# Altium footprint library Connectors.PcbLib: 320 footprints (part 2 of 20)
Each footprint in its own frame and in the unit in brackets; x right, y up, seen from the top. Pads: shape width x height; smd on the part's side, far side on the other; paste and mask are expansions set on the pad; w line width, h text height; cw(c..) or ccw(c..) is an arc to the next point about the centre after c.
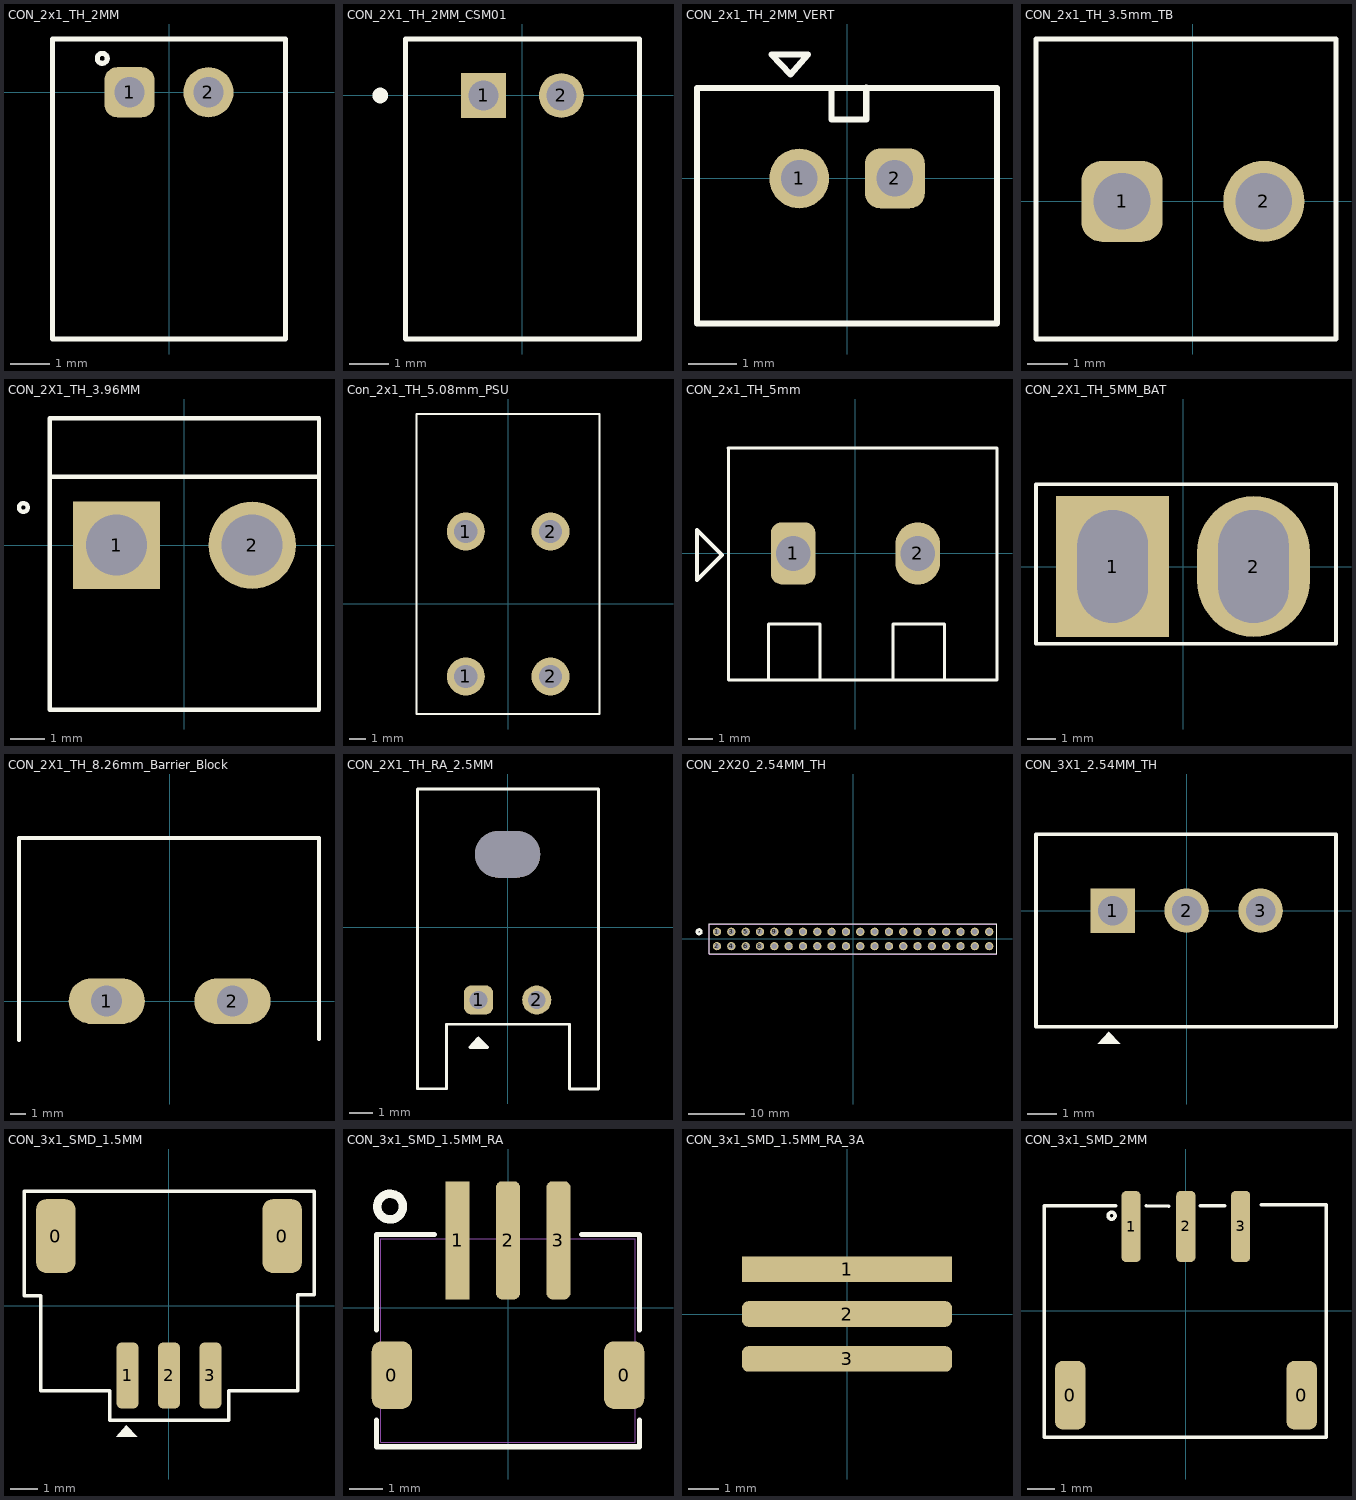
[diagram p1: the footprints below, top view; thin cyan lines are the x and y axes]

## CON_2x1_TH_2MM [mm] "/20190307/N-A.Potosi"
pads (2):
  rrect50% 1.27x1.27 hole 0.762: 1(-1,0)
  round 1.27 hole 0.762: 2(1,0)
Top Overlay:
  circle w0.127: c-1.69,0.86 r0.127
  lines w0.127: -2.95,-6.25 -2.95,1.35 2.95,1.35 2.95,-6.25 -2.95,-6.25
3D body "S2B-PH-K-S(LF)(SN)--3DModel-STEP-56544.STEP": height 4.8, standoff -3.38, extent -2.96,-6.27 2.94,1.33

## CON_2X1_TH_2MM_CSM01 [mm] "/20200121/V-A.Patino"
pads (2):
  rect 1.15x1.15 hole 0.762: 1(-1,0)
  round 1.15 hole 0.762: 2(1,0)
Top Overlay:
  circle w0.2: c-3.65,0 r0.1
  lines w0.127: -3,-6.25 -3,1.45 3.007,1.45 3.007,-6.25 -3,-6.25
3D body "c-440055-2-b3-3d.stp": height 4.96, standoff -3.39, extent -3,-6.25 3,1.45

## CON_2x1_TH_2MM_VERT [mm] "/20210803/J-E.Pachon"
pads (2):
  round 1.25 hole 0.762: 1(-1,0)
  rrect50% 1.25x1.25 hole 0.762: 2(1,0)
Top Overlay:
  lines w0.127: -0.33,1.89 -0.33,1.23 0.4,1.23 0.4,1.9 ; -3.136,-3.03 -3.136,1.89 3.132,1.89 3.132,-3.03 -3.136,-3.03 ; -1.58,2.589 -0.818,2.589 -1.184,2.175 -1.58,2.589
3D body "B2B-PH-K-S.step": height 6, standoff -3.4, extent -2.94,-2.77 2.96,1.93

## CON_2x1_TH_3.5mm_TB [mm] "/ 20190222 / C-A.Serna.A"
height 0.31
pads (2):
  rrect50% 2x2 hole 1.397: 1(-1.75,0)
  round 2 hole 1.397: 2(1.75,0)
Top Overlay:
  lines w0.127: -3.872,-3.395 -3.872,4.005 3.528,4.005 3.528,-3.395 -3.872,-3.395
3D body "691214110002 (rev1).stp": height 8.6, standoff -3.6, extent -3.872,-3.395 3.528,4.005

## CON_2X1_TH_3.96MM [mm] "/20220519/F-A.Ospina"
pads (2):
  rect 2.55x2.55 hole 1.778: 1(-1.98,0)
  round 2.55 hole 1.778: 2(1.98,0)
Top Overlay:
  circle w0.127: c-4.7,1.1 r0.127
  lines w0.127: -3.93,2 -3.93,3.7 3.93,3.7 3.93,2 ; -3.93,2 3.93,2 ; -3.93,2 -3.93,-4.8 3.93,-4.8 3.93,2
3D body "B2P-VH(LF)(SN)--3DModel-STEP-56544.STEP": height 10.91, standoff -3.69, extent -3.93,-4.6 3.93,3.9

## Con_2x1_TH_5.08mm_PSU [mil] "20190515 / V-A.Patino"
pads (4):
  round 90 hole 55: 1(-100,-171.26) 1(-100,171.26) 2(100,-171.26) 2(100,171.26)
Top Overlay:
  lines w5: -216.14,-259.84 -216.14,448.82 215.35,448.82 215.35,-259.84 -216.14,-259.84
3D body "1017503.stp": height 748.03, standoff -137.8, extent -216.14,-259.84 215.35,448.82

## CON_2x1_TH_5mm [mm] "/ 20201015 / C-A.Serna.A"
height 12.5
pads (2):
  rrect50% 1.8x2.5 hole 1.397: 1(-2.5,0)
  oval 1.8x2.5 hole 1.397: 2(2.5,0)
Top Overlay:
  lines w0.127: -5.103,4.229 5.68,4.229 5.68,-5.08 -5.101,-5.08 -5.101,4.229 ; -3.49,-5.08 -3.49,-2.83 -1.43,-2.83 -1.43,-5.08 ; 1.51,-5.08 1.51,-2.83 3.57,-2.83 3.57,-5.077
  lines w0.152: -6.36,-1.07 -6.36,0.94 -5.355,-0.065 -6.36,-1.07
3D body "1935161--3DModel-STEP-56544.STEP": height 11.41, standoff -3.49, extent -5,-5.1 5.4,3.9

## CON_2X1_TH_5MM_BAT [mm] "/20220107/J-E.Pachon"
pads (2):
  rect 4x5 hole 4 slot 2.5 at 0 deg: 1(-2.5,0)
  oval 4x5 hole 4 slot 2.5 at 0 deg: 2(2.5,0)
Top Overlay:
  lines w0.127: -5.218,-2.743 5.425,-2.743 5.425,2.921 -5.218,2.921 -5.218,-2.743
3D body "User Library-XT30.step": height 12.6, standoff -2.9, extent -5.109,-2.548 5.291,2.752

## CON_2X1_TH_8.26mm_Barrier_Block [mm] "/20200618 / C.E-Rincon"
pads (2):
  oval 5x3 hole 2.032: 1(-4.125,0) 2(4.125,0)
Top Overlay:
  lines w0.254: -9.875,-2.55 -9.875,10.7 9.8,10.7 9.8,-2.475
3D body "387007502.stp": height 12.71, standoff -3.54, extent -9.321,-2.55 9.221,10.15

## CON_2X1_TH_RA_2.5MM [mm] "/ 20200528 / J-P.Vargas.A"
pads (3):
  rrect50% 1.25x1.25 hole 0.762: 1(-1.25,-3.125)
  round 1.25 hole 0.762: 2(1.25,-3.125)
  oval 2.8x2 hole 2.794 slot 2 at 90 deg: ""(0,3.125)
Top Overlay:
  region: -1.621,-5.17 -0.859,-5.17 -1.254,-4.756
  lines w0.127: -3.879,-6.94 -3.879,5.93 3.91,5.93 3.91,-6.95 2.65,-6.95 2.65,-4.17 -2.63,-4.17 -2.63,-6.94 -3.879,-6.94 ; -1.621,-5.17 -0.859,-5.17 -1.254,-4.756 -1.621,-5.17
3D body "c-1744426-2-d-3d.stp": height 7.61, standoff -3.31, extent -3.73,-6.821 3.77,5.779

## CON_2X20_2.54MM_TH [mil] "/20220114/J-E.Pachon"
pads (40):
  round 58 hole 38 mask+0: 1(-950,50) 2(-950,-50) 3(-850,50) 4(-850,-50) 5(-750,50) 6(-750,-50) 7(-650,50) 8(-650,-50) 9(-550,50) 10(-550,-50) 11(-450,50) 12(-450,-50) 13(-350,50) 14(-350,-50) 15(-250,50) 16(-250,-50) 17(-150,50) 18(-150,-50) 19(-50,50) 20(-50,-50) 21(50,50) 22(50,-50) 23(150,50) 24(150,-50) 25(250,50) 26(250,-50) 27(350,50) 28(350,-50) 29(450,50) 30(450,-50) 31(550,50) 32(550,-50) 33(650,50) 34(650,-50) 35(750,50) 36(750,-50) 37(850,50) 38(850,-50) 39(950,50) 40(950,-50)
Top Overlay:
  circle w20: c-1074.5,50 r15
  lines w5: -1004.5,-104.5 -1004.5,104.5 1004.5,104.5 1004.5,-104.5 -1004.5,-104.5
Bottom Overlay:
  circle w20: c-1074.5,50 r15
Mechanical 1:
  lines w5: -1005,-105 -1005,104 1004,104 1004,-105 -1005,-105
3D body "015445840.stp": height 340, standoff -120, extent -1005,-100 994,99

## CON_3X1_2.54MM_TH [mil] "/20230123/J-E.Pachon"
pads (3):
  rect 60x60 hole 40: 1(-100,0)
  round 60 hole 40: 2(0,0) 3(100,0)
Top Overlay:
  region: -119.9,-179.8 -89.9,-179.8 -105.46,-163.48
  lines w5: -203.54,-157 -203.54,103 201.97,103 201.97,-157 -203.54,-157
3D body "705430037.stp": height 464.96, standoff -130.04, extent -200,-160 200,100

## CON_3x1_SMD_1.5MM [mm] "/202010001/J-E.Pachon"
pads (5):
  rrect50% 1.419x2.667 smd: 0(-4.1,2.525) 0(4.1,2.525)
  rrect50% 0.8x2.4 smd: 1(-1.5,-2.525) 2(0,-2.525) 3(1.5,-2.525)
Top Overlay:
  region: -1.91,-4.742 -1.148,-4.742 -1.543,-4.327
  lines w0.127: -5.243,0.355 -5.243,4.145 5.257,4.145 5.257,0.405 4.657,0.405 4.657,-3.075 2.157,-3.075 2.157,-4.152 -2.143,-4.152 -2.143,-3.075 -4.643,-3.075 -4.643,0.355 -5.243,0.355
3D body "5025840370.stp": height 6.81, standoff -0.49, extent -4.423,-3.212 4.377,4.188

## CON_3x1_SMD_1.5MM_RA [mil] "20221111 /V-A.Patino"
pads (5):
  rrect50% 47x79 smd: 0(-135.83,-78.74) 0(135.83,-78.74)
  rect 28x138 smd: 1(-59,78.74)
  rrect50% 28x138 smd: 2(0,78.74) 3(59,78.74)
Top Overlay:
  circle w10: c-137.8,118.11 r15
  lines w6: -153.5,-131.34 -153.5,-162.48 153.5,-162.48 153.5,-131.34 ; -153.5,-26.14 -153.5,85.52 -86.1,85.52 ; 86.1,85.52 153.5,85.52 153.5,-26.14
Mechanical 1:
  lines w1: -148.5,-157.48 148.5,-157.48 148.5,80.52 -148.5,80.52 -148.5,-157.48
3D body: height 145.67, standoff 0, extent -148.5,-157.48 148.5,80.52
3D body: height 10, standoff 0, extent -10,-48.48 0,-38.48

## CON_3x1_SMD_1.5MM_RA_3A [mm] "/20230802/J-A.Sepulveda"
pads (3):
  rect 7x0.85 smd: 1(0,1.5)
  rrect50% 7x0.85 smd: 2(0,0) 3(0,-1.5)
3D body "5-1775444-3.stp": height 4.51, standoff 0.01, extent -3.5,-3 3.5,3

## CON_3x1_SMD_2MM [mm]
pads (5):
  rrect50% 1.1x2.5 smd: 0(-4.225,-3.08) 0(4.225,-3.08)
  rrect50% 0.7x2.6 smd: 1(-2.006,3.077) 2(-0.006,3.08) 3(1.994,3.08)
Top Overlay:
  circle w0.127: c-2.716,3.472 r0.127
  lines w0.127: -5.175,-4.61 -5.175,3.832 -2.556,3.832 ; -5.161,-4.61 5.125,-4.61 5.125,3.87 2.755,3.87 ; -1.456,3.832 -0.625,3.82 ; 0.525,3.832 1.423,3.832
3D body "S3B-PH-SM4-TB(LF)(SN)--3DModel-STEP-56544.STEP": height 5.42, standoff -0.18, extent -4.965,-4.43 4.935,4.17